# Altium footprint library ATK-DNN647_V1.0.PcbLib: 73 footprints (part 5 of 5)
Each footprint in its own frame and in the unit in brackets; x right, y up, seen from the top. Pads: shape width x height; smd on the part's side, far side on the other; paste and mask are expansions set on the pad; w line width, h text height; cw(c..) or ccw(c..) is an arc to the next point about the centre after c.
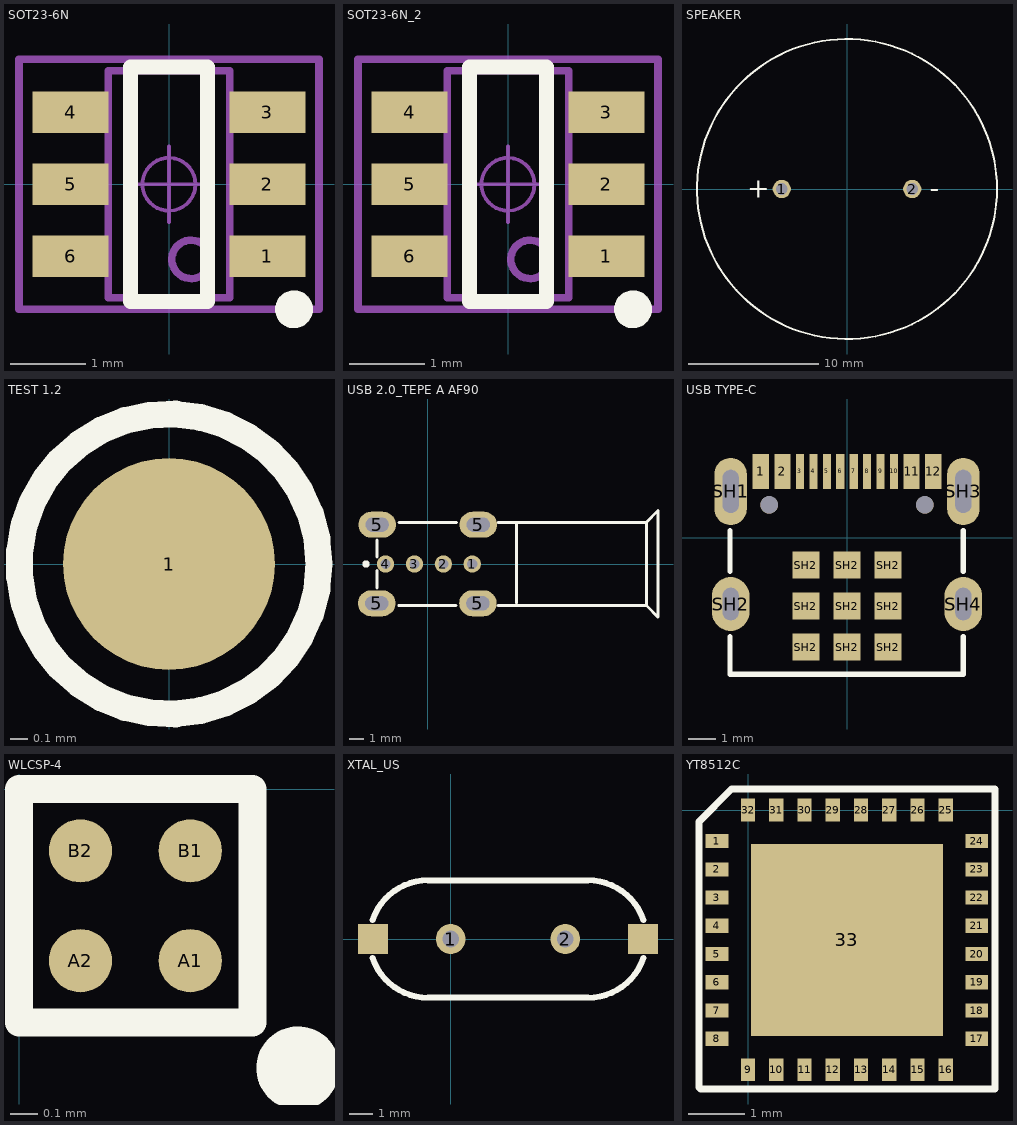
[diagram p4: the footprints below, top view; thin cyan lines are the x and y axes]

## SOT23-6N [mm] "3x1.6x1.1mm(长宽高)"
height 1.45
pads (6):
  rect 1x0.55 smd: 1(1.3,-0.95) 2(1.3,0) 3(1.3,0.95) 4(-1.3,0.95) 5(-1.3,0) 6(-1.3,-0.95)
Top Overlay:
  circle w0.25: c1.651,-1.651 r0.125
  lines w0.2: -0.508,-1.55 0.508,-1.55 0.508,1.55 -0.508,1.55 -0.508,-1.55
Mechanical 13:
  circle w0.1: c0.292,-0.992 r0.254
  lines w0.1: -0.8,-1.5 -0.8,1.5 0.8,1.5 0.8,-1.5 -0.8,-1.5
Mechanical 15:
  circle w0.05: c0,0 r0.35
  lines w0.05: -0.5,0 0.5,0 ; 0,-0.5 0,0.5
  lines w0.1: -1.981,-1.651 -1.981,1.651 1.981,1.651 1.981,-1.651 -1.981,-1.651
3D body "SOT23-6.STEP": height 1.15, standoff -0.03, extent -1.403,-1.5 1.403,1.5

## SOT23-6N_2 [mm]
pads (6):
  rect 1x0.55 smd: 1(1.3,-0.95) 2(1.3,0) 3(1.3,0.95) 4(-1.3,0.95) 5(-1.3,0) 6(-1.3,-0.95)
Top Overlay:
  circle w0.25: c1.651,-1.651 r0.125
  lines w0.2: -0.508,-1.55 -0.508,1.55 0.508,1.55 0.508,-1.55 -0.508,-1.55
Mechanical 13:
  circle w0.1: c0.292,-0.992 r0.254
  lines w0.1: -0.8,-1.5 0.8,-1.5 0.8,1.5 -0.8,1.5 -0.8,-1.5
Mechanical 15:
  circle w0.05: c0,0 r0.35
  lines w0.05: -0.5,0 0.5,0 ; 0,-0.5 0,0.5
  lines w0.1: -1.981,-1.651 1.981,-1.651 1.981,1.651 -1.981,1.651 -1.981,-1.651
3D body "SOT23-6.STEP": height 1.15, standoff -0.03, extent -1.403,-1.5 1.403,1.5

## SPEAKER [mm] "2307喇叭，8Ω，1W，23mm*7mm，2P"
height 7
pads (2):
  round 1.4 hole 0.9: 1(-5,0) 2(5,0)
Top Overlay:
  circle w0.152: c0,0 r11.5
  text "-" at 6.332,-0.653 h1.52
  text "+" at -7.638,-0.653 h1.52

## TEST 1.2 [mm] "测试点1.2mm"
pads (1):
  round 1.2 smd: 1(0,0)
Top Overlay:
  circle w0.152: c0,0 r0.85

## USB 2.0_TEPE A AF90 [mm] "USB 2.0_TEPE A 型母头，侧插"
height 0.75
pads (8):
  round 1.2 hole 0.7: 1(3.094,0) 2(1.094,0) 3(-0.906,0) 4(-2.906,0)
  oval 2.6x1.8 hole 1 slot 1.6 at 0 deg: 5(-3.513,-2.718) 5(-3.487,2.718) 5(3.487,-2.718) 5(3.513,2.718)
Top Overlay:
  circle w0.25: c-4.256,0 r0.125
  lines w0.127: -3.513,-2.718 -3.487,-2.692
  lines w0.2: -1.996,-2.878 1.97,-2.878 ; -1.97,2.878 1.996,2.878 ; 4.881,-2.88 15.146,-2.88 15.146,2.896 ; 4.881,2.88 15.146,2.88
  lines w0.203: -3.487,-1.651 -3.487,-0.455 ; -3.487,0.481 -3.487,1.651 ; 6.17,-2.71 6.17,2.751 ; 15.146,-2.88 15.949,-3.683 15.949,3.698 15.146,2.896
3D body "USB-4H4.stp": height 14.45, standoff -3.69, extent -4.071,-3.606 15.179,3.644

## USB TYPE-C [mm]
height 9
pads (27):
  rect 0.6x1.3 smd mask+0.064: 1(-3.2,2.462) 2(-2.4,2.462) 11(2.4,2.462) 12(3.2,2.462)
  rect 0.3x1.3 smd mask+0.064: 3(-1.75,2.462) 4(-1.25,2.462) 5(-0.75,2.462) 6(-0.25,2.463) 7(0.25,2.463) 8(0.75,2.462) 9(1.25,2.462) 10(1.75,2.462)
  oval 1.2x2.5 hole 0.6 slot 1.6 at 90 deg: SH1(-4.32,1.718) SH3(4.32,1.717)
  oval 1.4x2 hole 0.6 slot 1.2 at 90 deg: SH2(-4.32,-2.462) SH4(4.32,-2.462)
  rect 1x1 smd mask+0: SH2(-1.524,-4.064) SH2(-1.524,-2.54) SH2(-1.524,-1.016) SH2(0,-4.064) SH2(0,-2.54) SH2(0,-1.016) SH2(1.524,-4.064)
  rect 1x1 smd paste+0 mask+0: SH2(1.524,-2.54) SH2(1.524,-1.016)
  round 0.65 hole 0.65 unplated mask+0: ""(-2.89,1.218) ""(2.89,1.218)
Top Overlay:
  lines w0.2: -4.343,-3.683 -4.343,-5.066 4.32,-5.066 4.32,-3.683 ; -4.343,-1.245 -4.343,0.254 ; 4.318,-1.245 4.318,0.254
3D body "User Library-USB Type C Port (SMD Type).STEP": height 3.2, standoff -1, extent -4.47,-5.04 4.47,2.86

## WLCSP-4 [mm] "WLCSP-4_L0.8-W0.8-R2-C2-P0.40-BL"
pads (4):
  round 0.23 smd mask+0.051: A1(0.623,-0.625) A2(0.224,-0.625) B1(0.623,-0.225) B2(0.224,-0.225)
Top Overlay:
  circle w0.152: c1.016,-1.016 r0.076
  lines w0.102: 0,-0.85 0,0 0.85,0 0.85,-0.85 0,-0.85

## XTAL_US [mil]
height 354.33
pads (4):
  round 50 hole 28: 1(0,0) 2(192.13,0)
  rect 50x50 smd: ""(-130.32,0) ""(322.44,0)
Top Overlay:
  lines w10: -130.92,-31.85 ccw(c-37.79,0) -37.79,-98.42 ; -130.92,31.85 cw(c-37.79,0) -37.79,98.43 ; -38,98.42 229.92,98.43 cw(c229.92,0) 323.05,31.85 ; -37.8,-98.43 229.92,-98.42 ccw(c229.92,0) 323.05,-31.85

## YT8512C [mm]
height 1.6
pads (33):
  rect 0.4x0.25 smd: 1(-0.55,-0.55) 2(-0.55,-1.05) 3(-0.55,-1.55) 4(-0.55,-2.05) 5(-0.55,-2.55) 6(-0.55,-3.05) 7(-0.55,-3.55) 8(-0.55,-4.05) 17(4.05,-4.05) 18(4.05,-3.55) 19(4.05,-3.05) 20(4.05,-2.55) 21(4.05,-2.05) 22(4.05,-1.55) 23(4.05,-1.05) 24(4.05,-0.55)
  rect 0.25x0.4 smd: 9(0,-4.6) 10(0.5,-4.6) 11(1,-4.6) 12(1.5,-4.6) 13(2,-4.6) 14(2.5,-4.6) 15(3,-4.6) 16(3.5,-4.6) 25(3.5,0) 26(3,0) 27(2.5,0) 28(2,0) 29(1.5,0) 30(1,0) 31(0.5,0) 32(0,0)
  rrect0% 3.4x3.4 smd: 33(1.75,-2.3)
Top Overlay:
  lines w0.127: -0.871,-4.909 -0.871,-0.208 -0.291,0.372 4.374,0.372 4.374,-4.939 -0.841,-4.939 -0.871,-4.909